# Altium schematic symbol library TPS3430WDRCR.SchLib: 1 symbol
Pins are listed as number, name and electrical type; pins without a type are passive.

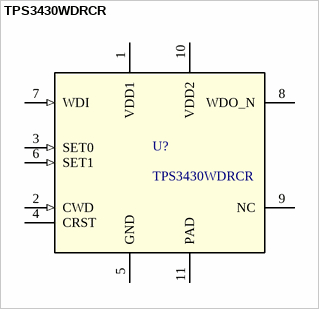
[diagram p0: symbol TPS3430WDRCR]

## TPS3430WDRCR
designator U?
Window watchdog timer with programmable reset delay 10-VSON -40 to 125; Manufacturer_Name: Texas Instruments; TYPE: TYPE; RefDes: RefDes; Copyright: Copyright (C) 2026 Ultra Librarian. All rights reserved.; Manufacturer_Part_Number: TPS3430WDRCR
footprint DRC0010J
pins: 1 VDD1 (power), 2 CWD (in), 3 SET0 (in), 4 CRST, 5 GND (power), 6 SET1 (in), 7 WDI (in), 8 WDO_N (oc), 9 NC, 10 VDD2 (power), 11 PAD (power)